# Altium footprint library Connectors.PcbLib: 120 footprints (part 1 of 8)
Each footprint in its own frame and in the unit in brackets; x right, y up, seen from the top. Pads: shape width x height; smd on the part's side, far side on the other; paste and mask are expansions set on the pad; w line width, h text height; cw(c..) or ccw(c..) is an arc to the next point about the centre after c.
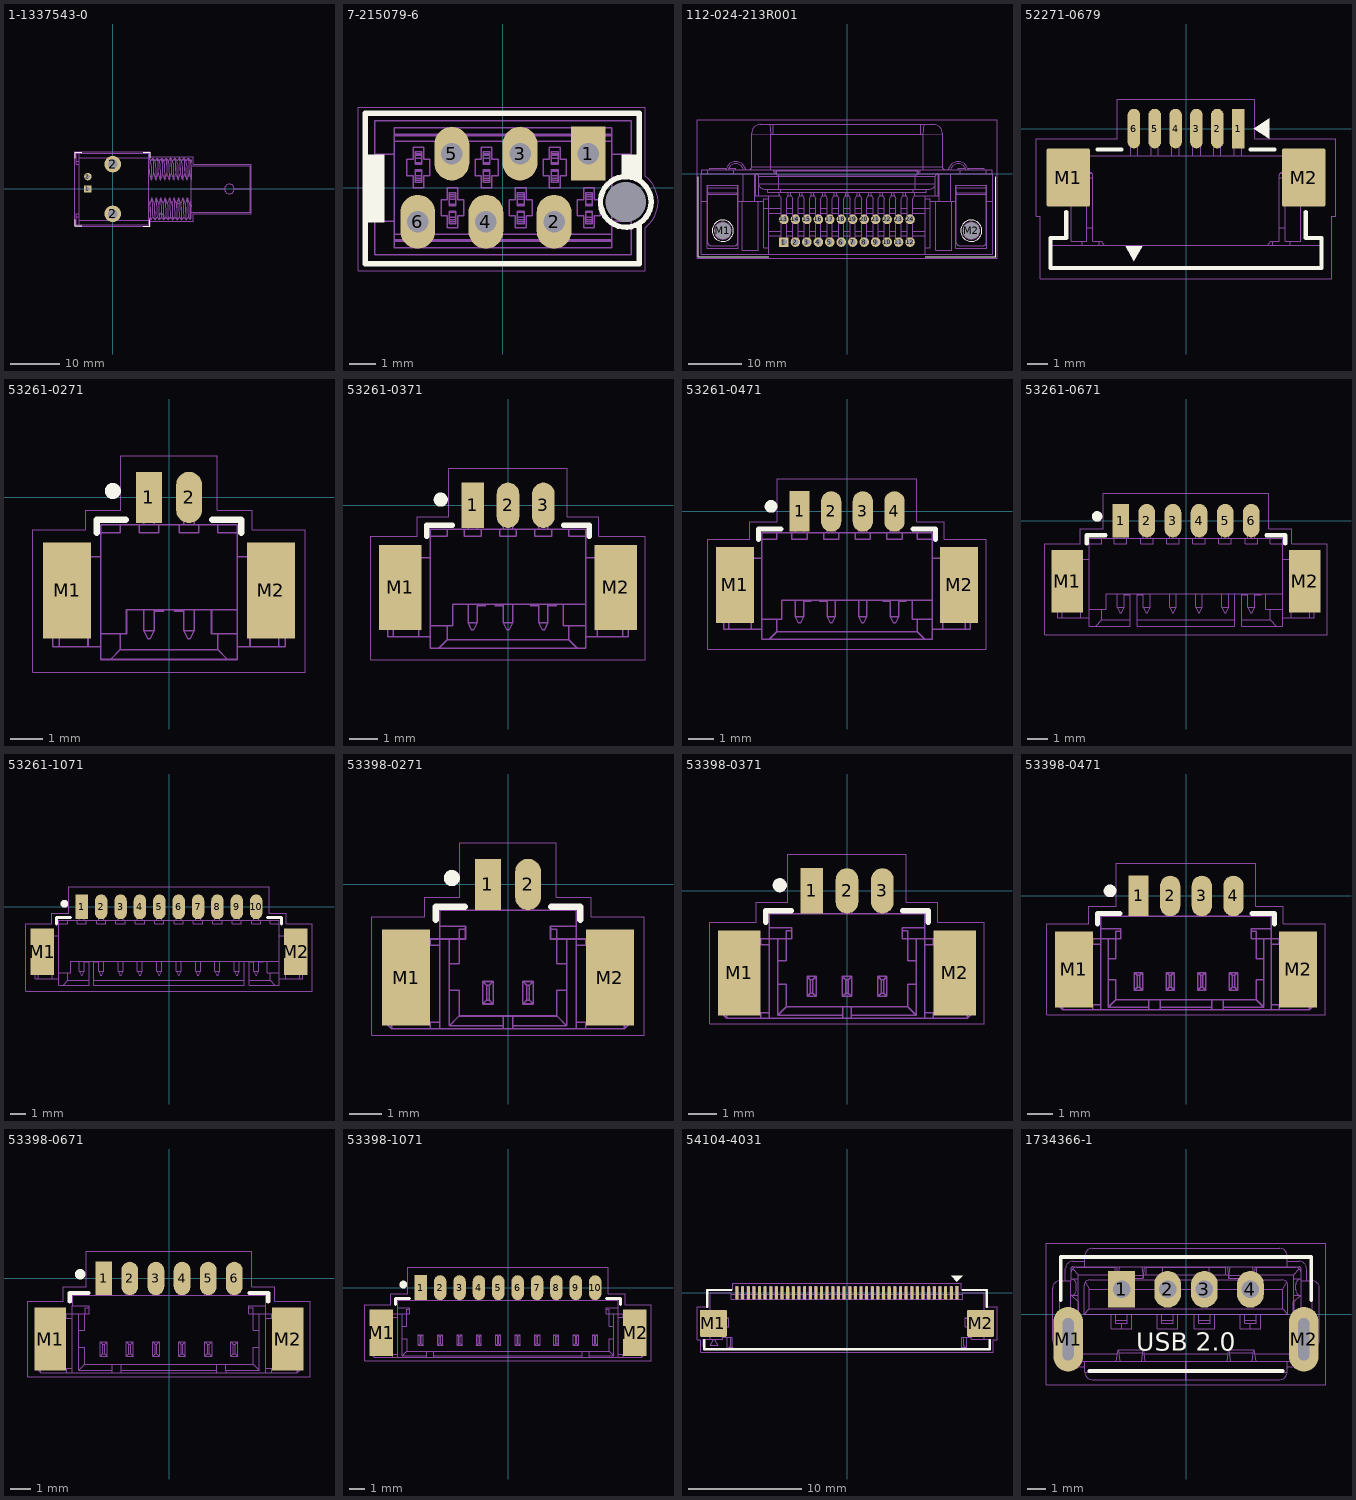
[diagram p0: the footprints below, top view; thin cyan lines are the x and y axes]

## 1-1337543-0 [mm] "BNC Connector"
height 0.6
pads (4):
  rect 1.53x1.53 hole 0.9: 1(-5.08,0)
  round 1.53 hole 0.9: 2(-5.08,2.54)
  round 3.4 hole 2: 2(0,-5.08) 2(0,5.08)
Top Overlay:
  lines w0.2: -7.65,-6.28 -7.65,-7.55 -6.38,-7.55 ; -7.65,6.28 -7.65,7.55 -6.38,7.55 ; 6.255,-7.575 7.525,-7.575 7.525,-6.305 ; 6.28,7.55 7.55,7.55 7.55,6.28
Top Courtyard:
  lines w0.025: -7.75,-7.65 7.65,-7.65 7.65,-6.6 16.4,-6.6 16.4,-5.1 28.35,-5.1 28.35,5.1 16.4,5.1 16.4,6.6 7.65,6.6 7.65,7.65 -7.75,7.65 -7.75,-7.65
Top Assembly:
  drawing of 1252 lines, arcs and shapes, not listed
  text ".Designator" at -6.763,-0.679 h3
3D body "1-1337543-0.STEP": height 15.85, standoff -4.25, extent -7.425,-7.35 28.075,7.35

## 7-215079-6 [mm] "Micro-MaTch Industrial Connector, 6 pin"
height 4
pads (7):
  rect 1.3x2 hole 0.8 mask+0.05: 1(3.175,1.27)
  oval 1.3x2 hole 0.8 mask+0.05: 2(1.905,-1.27) 3(0.635,1.27) 4(-0.635,-1.27) 5(-1.905,1.27) 6(-3.175,-1.27)
  round 0 hole 1.5 unplated: KEY(4.575,-0.53)
Top Overlay:
  circle w0.2: c4.575,-0.53 r0.943
  region: 4.425,1.22 5.125,1.22 5.125,0.4 4.425,0.4
  region: -4.425,1.22 -5.125,1.22 -5.125,-1.28 -4.425,-1.28
  lines w0.2: 5.075,-1.33 5.075,-2.83 -5.125,-2.83 -5.125,2.77 5.075,2.77 5.075,0.27
Top Courtyard:
  lines w0.025: -5.4,-3.1 5.3,-3.1 5.3,-1.486 ccw(c4.575,-0.53) 5.3,0.426 5.3,3 -5.4,3 -5.4,-3.1
Top Assembly:
  drawing of 386 lines, arcs and shapes, not listed
  text ".Designator" at -4.511,-3.953 h2
3D body "7-215079-6.STEP": height 4.2, standoff -2.95, extent -4.78,-2.5 4.78,2.5

## 112-024-213R001 [mm] "SCSI .085\" Ribbon Connector GPIB (IEEE-488)"
height 4
pads (26):
  rect 1.8x1.8 hole 1.1 paste-2539.97 mask+0: 1(-11.88,-12.85)
  round 1.8 hole 1.1 paste-2539.97 mask+0: 2(-9.72,-12.85) 3(-7.56,-12.85) 4(-5.4,-12.85) 5(-3.24,-12.85) 6(-1.08,-12.85) 7(1.08,-12.85) 8(3.24,-12.85) 9(5.4,-12.85) 10(7.56,-12.85) 11(9.72,-12.85) 12(11.88,-12.85) 13(-11.88,-8.56) 14(-9.72,-8.56) 15(-7.56,-8.56) 16(-5.4,-8.56) 17(-3.24,-8.56) 18(-1.08,-8.56) 19(1.08,-8.56) 20(3.24,-8.56) 21(5.4,-8.56) 22(7.56,-8.56) 23(9.72,-8.56) 24(11.88,-8.56)
  round 3.1 hole 3.1 unplated paste-2539.97 mask-1.549: M1(-23.4,-10.705) M2(23.4,-10.705)
Top Overlay:
  circle w0.2: c23.4,-10.705 r2
  circle w0.2: c-23.4,-10.705 r2
  lines w0.2: -28,-0.5 -28,-15.6 -14.7,-15.6 ; 14.7,-15.6 28,-15.6 28,-0.5
Top Courtyard:
  lines w0.025: -28.25,-15.85 -28.25,10.15 28.25,10.15 28.25,-15.85 -28.25,-15.85
Top Assembly:
  drawing of 461 lines, arcs and shapes, not listed
  text ".Designator" at -6.763,3.821 h3
3D body "112-024-213R001.x_t": height 15.36, standoff -4.49, extent -27.49,-15.1 27.49,9.37

## 52271-0679 [mm] "FFC/FPC Connector, 1.00mm Pitch, Slider Series, Right-Angle, Bottom Contact, 3.00mm Height, 6 Circuits, Tin-Bismuth Plating"
height 0.6
pads (8):
  rect 0.6x1.9 smd paste+0 mask+0.075: 1(2.5,0)
  oval 0.6x1.9 smd paste+0 mask+0.075: 2(1.5,0) 3(0.5,0) 4(-0.5,0) 5(-1.5,0) 6(-2.5,0)
  rrect10% 2.1x2.8 smd paste-50 mask+0.075: M1(-5.65,-2.35) M2(5.65,-2.35)
Top Overlay:
  region: 3.25,0 4,0.5 4,-0.5
  region: -2.5,-6.35 -2.1,-5.65 -2.9,-5.65
  lines w0.2: -5.75,-4 -5.75,-5.25 -6.5,-5.25 -6.5,-6.7 0,-6.7 6.5,-6.7 6.5,-5.25 5.75,-5.25 5.75,-4 ; -4.25,-1 -3.1,-1 ; 3.1,-1 4.25,-1
Top Paste:
  region: 5.75,-2.5 5.75,-3.5 6.7,-3.5 6.7,-2.5
  region: 5.75,-1.3 5.75,-2.3 6.7,-2.3 6.7,-1.3
  rectangle: 4.6,-3.5 5.6,-2.5
  rectangle: 4.6,-2.3 5.55,-1.3
  region: -5.55,-2.5 -5.55,-3.5 -4.6,-3.5 -4.6,-2.5
  region: -5.55,-1.3 -5.55,-2.3 -4.6,-2.3 -4.6,-1.3
  rectangle: -6.7,-3.5 -5.7,-2.5
  rectangle: -6.7,-2.3 -5.75,-1.3
Top Courtyard:
  lines w0.025: -7.2,-4.2 -7.2,-0.5 -3.3,-0.5 -3.3,1.4 3.3,1.4 3.3,-0.5 7.2,-0.5 7.2,-4.2 7,-4.2 7,-7.2 -7,-7.2 -7,-4.2 -7.2,-4.2
Top Assembly:
  lines w0.05: -5.5,-3.3 -5.746,-3.3 ; -4.975,-5.6 -4.975,-5.4 ; -4.775,-4.75 -4.475,-4.75 ; -4.775,-2.35 -4.475,-2.35 ; -4.737,-2.15 -4.513,-2.15 ; -4.175,-5.6 -4.175,-5.4 ; -2.675,-1.3 -2.675,0.7 -2.325,0.7 -2.325,-1.3 ; -1.675,-1.3 -1.675,0.7 -1.325,0.7 -1.325,-1.3 ; -0.675,-1.3 -0.675,0.7 -0.325,0.7 -0.325,-1.3 ; 0.325,-1.3 0.325,0.7 0.675,0.7 0.675,-1.3 ; 1.325,-1.3 1.325,0.7 1.675,0.7 1.675,-1.3 ; 2.325,-1.3 2.325,0.7 2.675,0.7 2.675,-1.3 ; 4.175,-5.6 4.175,-5.4 ; 4.475,-4.75 4.775,-4.75 ; 4.475,-2.35 4.775,-2.35 ; 4.513,-2.15 4.737,-2.15 ; 4.975,-5.6 4.975,-5.4 ; 5.5,-3.3 5.746,-3.3 ; -6.15,-3.1 -5.896,-3.1 ; -6.15,-3.1 -6.15,-1.5 ; -6.15,-3.1 -6.15,-3.3 -5.896,-3.3 ; -6.15,-1.5 -5.896,-1.5 ; -6.15,-1.5 -6.15,-1.3 -5.896,-1.3 ; -5.896,-3.3 -5.896,-3.1 ; -5.896,-3.3 -5.746,-3.3 ; -5.896,-3.1 -5.896,-1.5 ; -5.896,-1.5 -5.896,-1.3 ; -5.896,-1.3 -5.746,-1.3 ; -5.746,-3.3 -5.746,-1.3 ; -5.746,-1.3 -5.5,-1.3 ; -5.5,-1.3 -5.5,-5.4 -4.775,-5.4 -4.775,-2.25 cw(c-4.625,-2.25) -4.475,-2.25 -4.475,-5.4 -4.075,-5.4 -3.925,-5.6 ; -5.5,-1.3 5.5,-1.3 ; -3.925,-5.6 3.925,-5.6 ; -3.925,-5.6 -6.5,-5.6 -6.5,-6.7 6.5,-6.7 6.5,-5.6 3.925,-5.6 ; 3.925,-5.6 4.075,-5.4 4.475,-5.4 4.475,-2.25 cw(c4.625,-2.25) 4.775,-2.25 4.775,-5.4 5.5,-5.4 5.5,-1.3 ; 5.5,-1.3 5.746,-1.3 ; 5.746,-3.3 5.746,-1.3 ; 5.746,-3.3 5.896,-3.3 ; 5.746,-1.3 5.896,-1.3 ; 5.896,-3.3 6.15,-3.3 6.15,-3.1 ; 5.896,-3.3 5.896,-3.1 ; 5.896,-3.1 6.15,-3.1 ; 5.896,-3.1 5.896,-1.5 ; 5.896,-1.5 6.15,-1.5 ; 5.896,-1.5 5.896,-1.3 ; 5.896,-1.3 6.15,-1.3 6.15,-1.5 ; 6.15,-3.1 6.15,-1.5 ; -2.9,-5.657 -2.5,-6.35 -2.1,-5.657 -2.9,-5.657
  text ".Designator" at -6.763,-3.936 h3
3D body "522710679.stp": height 3, standoff 0, extent -6.5,-6.7 6.5,0.7

## 53261-0271 [mm]
height 1.55
pads (4):
  rect 0.8x1.6 smd mask+0.05: 1(-0.625,0)
  oval 0.8x1.6 smd mask+0.05: 2(0.625,0)
  rect 1.5x3 smd paste-2 mask+0.02: M1(-3.175,-2.9) M2(3.175,-2.9)
Top Overlay:
  circle w0.25: c-1.75,0.2 r0.125
  lines w0.2: -2.25,-1.1 -2.25,-0.7 -1.35,-0.7 ; 1.35,-0.7 2.25,-0.7 2.25,-1.1
Top Paste:
  rectangle: 2.5,-2.8 3.85,-1.45
  rectangle: 2.5,-4.35 3.85,-3
  rectangle: -3.85,-2.8 -2.5,-1.45
  rectangle: -3.85,-4.35 -2.5,-3
Top Courtyard:
  lines w0.025: -4.25,-5.45 4.25,-5.45 4.25,-1 2.6,-1 2.6,-0.4 1.5,-0.4 1.5,1.3 -1.5,1.3 -1.5,-0.4 -2.6,-0.4 -2.6,-1 -4.25,-1 -4.25,-5.45
Top Assembly:
  drawing of 229 lines, arcs and shapes, not listed
  text ".Designator" at -4.511,-2.953 h2
3D body "User Library-molex 53261.step": height 3.5, standoff 0, extent -3.825,-5.075 3.825,0.125

## 53261-0371 [mm]
height 1.55
pads (5):
  rect 0.8x1.6 smd mask+0.05: 1(-1.25,0)
  oval 0.8x1.6 smd mask+0.05: 2(0,0) 3(1.25,0)
  rect 1.5x3 smd paste-2 mask+0.02: M1(-3.8,-2.9) M2(3.8,-2.9)
Top Overlay:
  circle w0.25: c-2.375,0.2 r0.125
  lines w0.2: -2.875,-1.1 -2.875,-0.7 -1.975,-0.7 ; 1.975,-0.7 2.875,-0.7 2.875,-1.1
Top Paste:
  rectangle: 3.125,-2.8 4.475,-1.45
  rectangle: 3.125,-4.35 4.475,-3
  rectangle: -4.475,-2.8 -3.125,-1.45
  rectangle: -4.475,-4.35 -3.125,-3
Top Courtyard:
  lines w0.025: -4.85,-5.45 -4.85,-1.1 -3.2,-1.1 -3.2,-0.4 -2.1,-0.4 -2.1,1.3 2.1,1.3 2.1,-0.4 3.2,-0.4 3.2,-1.1 4.85,-1.1 4.85,-5.45 -4.85,-5.45
Top Assembly:
  drawing of 237 lines, arcs and shapes, not listed
  text ".Designator" at -4.511,-2.953 h2
3D body "User Library-molex 53261 (1).step": height 3.5, standoff 0, extent -4.45,-5.05 4.45,0.15

## 53261-0471 [mm]
height 1.55
pads (6):
  rect 0.8x1.6 smd mask+0.05: 1(-1.875,0)
  oval 0.8x1.6 smd mask+0.05: 2(-0.625,0) 3(0.625,0) 4(1.875,0)
  rect 1.5x3 smd paste-2 mask+0.02: M1(-4.425,-2.9) M2(4.425,-2.9)
Top Overlay:
  circle w0.25: c-3,0.2 r0.125
  lines w0.2: -3.5,-1.1 -3.5,-0.7 -2.6,-0.7 ; 2.6,-0.7 3.5,-0.7 3.5,-1.1
Top Paste:
  rectangle: 3.75,-2.8 5.1,-1.45
  rectangle: 3.75,-4.35 5.1,-3
  rectangle: -5.1,-2.8 -3.75,-1.45
  rectangle: -5.1,-4.35 -3.75,-3
Top Courtyard:
  lines w0.025: -5.5,-5.45 -5.5,-1.1 -3.85,-1.1 -3.85,-0.4 -2.75,-0.4 -2.75,1.3 2.75,1.3 2.75,-0.4 3.85,-0.4 3.85,-1.1 5.5,-1.1 5.5,-5.45 -5.5,-5.45
Top Assembly:
  drawing of 236 lines, arcs and shapes, not listed
  text ".Designator" at -4.511,-2.953 h2
3D body "User Library-molex 53261.step": height 3.5, standoff 0, extent -5.075,-5.05 5.075,0.15

## 53261-0671 [mm]
height 1.55
pads (8):
  rect 0.8x1.6 smd mask+0.05: 1(-3.125,0)
  oval 0.8x1.6 smd mask+0.05: 2(-1.875,0) 3(-0.625,0) 4(0.625,0) 5(1.875,0) 6(3.125,0)
  rect 1.5x3 smd paste-2 mask+0.02: M1(-5.675,-2.9) M2(5.675,-2.9)
Top Overlay:
  circle w0.25: c-4.25,0.2 r0.125
  lines w0.2: -4.75,-1.1 -4.75,-0.7 -3.85,-0.7 ; 3.85,-0.7 4.75,-0.7 4.75,-1.1
Top Paste:
  rectangle: -6.35,-4.35 -5,-3
  rectangle: -6.35,-2.8 -5,-1.45
  rectangle: 5,-4.35 6.35,-3
  rectangle: 5,-2.8 6.35,-1.45
Top Courtyard:
  lines w0.025: -6.75,-5.45 -6.75,-1.1 -5.05,-1.1 -5.05,-0.4 -3.95,-0.4 -3.95,1.3 3.95,1.3 3.95,-0.4 5.05,-0.4 5.05,-1.1 6.75,-1.1 6.75,-5.45 -6.75,-5.45
Top Assembly:
  drawing of 246 lines, arcs and shapes, not listed
  text ".Designator" at -4.511,-2.953 h2
3D body "User Library-molex 53261.step": height 3.5, standoff 0, extent -6.325,-5.05 6.325,0.15

## 53261-1071 [mm]
height 1.55
pads (12):
  rect 0.8x1.6 smd mask+0.05: 1(-5.625,0)
  oval 0.8x1.6 smd mask+0.05: 2(-4.375,0) 3(-3.125,0) 4(-1.875,0) 5(-0.625,0) 6(0.625,0) 7(1.875,0) 8(3.125,0) 9(4.375,0) 10(5.625,0)
  rect 1.5x3 smd paste-2 mask+0.02: M1(-8.175,-2.9) M2(8.175,-2.9)
Top Overlay:
  circle w0.25: c-6.75,0.2 r0.125
  lines w0.2: -7.25,-1.1 -7.25,-0.7 -6.35,-0.7 ; 6.35,-0.7 7.25,-0.7 7.25,-1.1
Top Paste:
  rectangle: 7.5,-2.8 8.85,-1.45
  rectangle: 7.5,-4.35 8.85,-3
  rectangle: -8.85,-2.8 -7.5,-1.45
  rectangle: -8.85,-4.35 -7.5,-3
Top Courtyard:
  lines w0.025: -9.25,-5.45 -9.25,-1.1 -7.55,-1.1 -7.55,-0.4 -6.45,-0.4 -6.45,1.3 6.45,1.3 6.45,-0.4 7.55,-0.4 7.55,-1.1 9.25,-1.1 9.25,-5.45 -9.25,-5.45
Top Assembly:
  drawing of 246 lines, arcs and shapes, not listed
  text ".Designator" at -4.511,-2.953 h2
3D body "User Library-molex 53261.step": height 3.5, standoff 0, extent -8.825,-5.05 8.825,0.15

## 53398-0271 [mm]
height 1.55
pads (4):
  rect 0.8x1.6 smd mask+0.05: 1(-0.625,0)
  oval 0.8x1.6 smd mask+0.05: 2(0.625,0)
  rect 1.5x3 smd paste-2 mask+0.02: M1(-3.175,-2.9) M2(3.175,-2.9)
Top Overlay:
  circle w0.25: c-1.75,0.2 r0.125
  lines w0.2: -2.25,-1.1 -2.25,-0.7 -1.35,-0.7 ; 1.35,-0.7 2.25,-0.7 2.25,-1.1
Top Paste:
  rectangle: -3.85,-4.35 -2.5,-3
  rectangle: -3.85,-2.8 -2.5,-1.45
  rectangle: 2.5,-4.35 3.85,-3
  rectangle: 2.5,-2.8 3.85,-1.45
Top Courtyard:
  lines w0.025: -4.25,-4.7 -4.25,-1 -2.6,-1 -2.6,-0.4 -1.5,-0.4 -1.5,1.3 1.5,1.3 1.5,-0.4 2.6,-0.4 2.6,-1 4.25,-1 4.25,-4.7 -4.25,-4.7
Top Assembly:
  lines w0.05: -3.625,-2.3 -3.825,-2.5 -3.825,-4.3 -3.625,-4.5 ; -2.125,-4.3 -2.425,-4.3 ; -2.125,-1.9 -2.425,-1.9 ; -0.785,-0.8 -0.785,-0.3 -0.465,-0.3 -0.465,-0.8 ; 0.465,-0.8 0.465,-0.3 0.785,-0.3 0.785,-0.8 ; 2.125,-4.3 2.425,-4.3 ; 2.125,-1.9 2.425,-1.9 ; 3.625,-2.3 3.825,-2.5 3.825,-4.3 3.625,-4.5 ; -3.625,-4.5 -3.625,-1.7 -2.425,-1.7 ; -3.625,-4.5 -2.425,-4.5 ; -2.425,-4.5 -2.425,-4.3 ; -2.425,-4.5 -2.125,-4.5 ; -2.425,-4.3 -3.425,-4.3 -3.425,-1.9 -2.425,-1.9 ; -2.425,-1.9 -2.425,-1.7 ; -2.425,-1.7 -2.125,-1.7 ; -2.125,-4.5 -0.15,-4.5 ; -2.125,-4.5 -2.125,-1.7 ; -2.125,-1.7 -1.825,-1.7 ; -2.125,-1.7 -2.125,-1.3 ; -2.125,-1.3 -1.325,-1.3 -1.325,-1.4 ; -2.125,-1.3 -2.125,-0.8 2.125,-0.8 2.125,-1.3 ; -1.825,-4.4 -1.525,-4.1 ; -1.825,-4.4 -1.825,-3.3 ; -1.825,-4.4 -0.15,-4.4 ; -1.825,-3.3 -1.525,-3.3 -1.525,-4.1 ; -1.825,-3.3 -1.825,-2.475 ; -1.825,-2.475 -1.825,-1.7 ; -1.825,-2.475 -1.525,-2.475 -1.525,-1.7 ; -1.825,-1.7 -1.525,-1.7 ; -1.525,-4.1 -0.15,-4.1 ; -1.525,-1.7 -1.525,-1.4 -1.325,-1.4 ; -1.525,-1.7 -1.325,-1.7 -1.325,-1.4 ; -0.785,-3.725 -0.668,-3.608 ; -0.785,-3.725 -0.785,-3.025 ; -0.785,-3.725 -0.465,-3.725 ; -0.785,-3.025 -0.668,-3.142 ; -0.785,-3.025 -0.465,-3.025 ; -0.668,-3.608 -0.668,-3.142 ; -0.668,-3.608 -0.582,-3.608 ; -0.668,-3.142 -0.582,-3.142 ; -0.582,-3.608 -0.582,-3.142 ; -0.582,-3.608 -0.465,-3.725 ; -0.582,-3.142 -0.465,-3.025 ; -0.465,-3.725 -0.465,-3.025 ; -0.15,-4.5 -0.15,-4.4 ; -0.15,-4.5 0.15,-4.5 ; -0.15,-4.4 -0.15,-4.1 ; -0.15,-4.1 0.15,-4.1 ; 0.15,-4.5 0.15,-4.4 ; 0.15,-4.5 2.125,-4.5 ; 0.15,-4.4 1.825,-4.4 ; 0.15,-4.4 0.15,-4.1 ; 0.15,-4.1 1.525,-4.1 ; 0.465,-3.725 0.582,-3.608 ; 0.465,-3.725 0.465,-3.025 ; 0.465,-3.725 0.785,-3.725 ; 0.465,-3.025 0.582,-3.142 ; 0.465,-3.025 0.785,-3.025 ; 0.582,-3.608 0.582,-3.142 ; 0.582,-3.608 0.668,-3.608 ; 0.582,-3.142 0.668,-3.142 ; 0.668,-3.608 0.785,-3.725 ; 0.668,-3.608 0.668,-3.142 ; 0.668,-3.142 0.785,-3.025 ; 0.785,-3.725 0.785,-3.025 ; 1.325,-1.4 1.525,-1.4 1.525,-1.7 ; 1.325,-1.4 1.325,-1.3 2.125,-1.3 ; 1.325,-1.4 1.325,-1.7 1.525,-1.7 ; 1.525,-4.1 1.825,-4.4 ; 1.525,-4.1 1.525,-3.3 1.825,-3.3 ; 1.525,-1.7 1.525,-2.475 1.825,-2.475 ; 1.525,-1.7 1.825,-1.7 ; 1.825,-4.4 1.825,-3.3 ; 1.825,-3.3 1.825,-2.475 ; 1.825,-2.475 1.825,-1.7 ; 1.825,-1.7 2.125,-1.7 ; 2.125,-4.5 2.125,-1.7 ; 2.125,-4.5 2.425,-4.5 ; 2.125,-1.7 2.125,-1.3 ; 2.125,-1.7 2.425,-1.7 ; 2.425,-4.5 2.425,-4.3 ; 2.425,-4.5 3.625,-4.5 ; 2.425,-4.3 3.425,-4.3 3.425,-1.9 2.425,-1.9 ; 2.425,-1.9 2.425,-1.7 ; 2.425,-1.7 3.625,-1.7 3.625,-4.5
  text ".Designator" at -4.511,-2.328 h2
3D body "53398-0271.step": height 4.7, standoff 0, extent -3.825,-4.425 3.825,-0.225

## 53398-0371 [mm]
height 1.55
pads (5):
  rect 0.8x1.6 smd mask+0.05: 1(-1.25,0)
  oval 0.8x1.6 smd mask+0.05: 2(0,0) 3(1.25,0)
  rect 1.5x3 smd paste-2 mask+0.02: M1(-3.8,-2.9) M2(3.8,-2.9)
Top Overlay:
  circle w0.25: c-2.375,0.2 r0.125
  lines w0.2: -2.875,-1.1 -2.875,-0.7 -1.975,-0.7 ; 1.975,-0.7 2.875,-0.7 2.875,-1.1
Top Paste:
  rectangle: 3.125,-2.8 4.475,-1.45
  rectangle: 3.125,-4.35 4.475,-3
  rectangle: -4.475,-2.8 -3.125,-1.45
  rectangle: -4.475,-4.35 -3.125,-3
Top Courtyard:
  lines w0.025: -4.85,-4.7 4.85,-4.7 4.85,-1.1 3.2,-1.1 3.2,-0.4 2.1,-0.4 2.1,1.3 -2.1,1.3 -2.1,-0.4 -3.2,-0.4 -3.2,-1.1 -4.85,-1.1 -4.85,-4.7
Top Assembly:
  lines w0.05: -4.25,-2.3 -4.45,-2.5 -4.45,-4.3 -4.25,-4.5 ; -2.75,-4.3 -3.05,-4.3 ; -2.75,-1.9 -3.05,-1.9 ; -1.41,-0.8 -1.41,-0.3 -1.09,-0.3 -1.09,-0.8 ; -0.16,-0.8 -0.16,-0.3 0.16,-0.3 0.16,-0.8 ; 1.09,-0.8 1.09,-0.3 1.41,-0.3 1.41,-0.8 ; 2.75,-4.3 3.05,-4.3 ; 2.75,-1.9 3.05,-1.9 ; 4.25,-2.3 4.45,-2.5 4.45,-4.3 4.25,-4.5 ; -4.25,-4.5 -3.05,-4.5 ; -4.25,-4.5 -4.25,-1.7 -3.05,-1.7 ; -3.05,-4.5 -2.75,-4.5 ; -3.05,-4.5 -3.05,-4.3 ; -3.05,-4.3 -4.05,-4.3 -4.05,-1.9 -3.05,-1.9 ; -3.05,-1.9 -3.05,-1.7 ; -3.05,-1.7 -2.75,-1.7 ; -2.75,-4.5 -0.15,-4.5 ; -2.75,-4.5 -2.75,-1.7 ; -2.75,-1.7 -2.75,-1.3 ; -2.75,-1.7 -2.45,-1.7 ; -2.75,-1.3 -2.75,-0.8 2.75,-0.8 2.75,-1.3 ; -2.75,-1.3 -1.95,-1.3 -1.95,-1.4 ; -2.45,-4.4 -0.15,-4.4 ; -2.45,-4.4 -2.45,-3.3 ; -2.45,-4.4 -2.15,-4.1 ; -2.45,-3.3 -2.45,-2.475 ; -2.45,-3.3 -2.15,-3.3 -2.15,-4.1 ; -2.45,-2.475 -2.15,-2.475 -2.15,-1.7 ; -2.45,-2.475 -2.45,-1.7 ; -2.45,-1.7 -2.15,-1.7 ; -2.15,-4.1 -0.15,-4.1 ; -2.15,-1.7 -2.15,-1.4 -1.95,-1.4 ; -2.15,-1.7 -1.95,-1.7 -1.95,-1.4 ; -1.41,-3.725 -1.41,-3.025 ; -1.41,-3.725 -1.09,-3.725 ; -1.41,-3.725 -1.293,-3.608 ; -1.41,-3.025 -1.09,-3.025 ; -1.41,-3.025 -1.293,-3.142 ; -1.293,-3.608 -1.293,-3.142 ; -1.293,-3.608 -1.207,-3.608 ; -1.293,-3.142 -1.207,-3.142 ; -1.207,-3.608 -1.207,-3.142 ; -1.207,-3.608 -1.09,-3.725 ; -1.207,-3.142 -1.09,-3.025 ; -1.09,-3.725 -1.09,-3.025 ; -0.16,-3.725 -0.16,-3.025 ; -0.16,-3.725 0.16,-3.725 ; -0.16,-3.725 -0.043,-3.608 ; -0.16,-3.025 0.16,-3.025 ; -0.16,-3.025 -0.043,-3.142 ; -0.15,-4.5 0.15,-4.5 ; -0.15,-4.5 -0.15,-4.4 ; -0.15,-4.4 -0.15,-4.1 ; -0.15,-4.1 0.15,-4.1 ; -0.043,-3.608 -0.043,-3.142 ; -0.043,-3.608 0.043,-3.608 ; -0.043,-3.142 0.043,-3.142 ; 0.043,-3.608 0.043,-3.142 ; 0.043,-3.608 0.16,-3.725 ; 0.043,-3.142 0.16,-3.025 ; 0.15,-4.5 2.75,-4.5 ; 0.15,-4.5 0.15,-4.4 ; 0.15,-4.4 0.15,-4.1 ; 0.15,-4.4 2.45,-4.4 ; 0.15,-4.1 2.15,-4.1 ; 0.16,-3.725 0.16,-3.025 ; 1.09,-3.725 1.41,-3.725 ; 1.09,-3.725 1.09,-3.025 ; 1.09,-3.725 1.207,-3.608 ; 1.09,-3.025 1.41,-3.025 ; 1.09,-3.025 1.207,-3.142 ; 1.207,-3.608 1.207,-3.142 ; 1.207,-3.608 1.293,-3.608 ; 1.207,-3.142 1.293,-3.142 ; 1.293,-3.608 1.41,-3.725 ; 1.293,-3.608 1.293,-3.142 ; 1.293,-3.142 1.41,-3.025 ; 1.41,-3.725 1.41,-3.025 ; 1.95,-1.4 1.95,-1.3 2.75,-1.3 ; 1.95,-1.4 1.95,-1.7 2.15,-1.7 ; 1.95,-1.4 2.15,-1.4 2.15,-1.7 ; 2.15,-4.1 2.15,-3.3 2.45,-3.3 ; 2.15,-4.1 2.45,-4.4 ; 2.15,-1.7 2.45,-1.7 ; 2.15,-1.7 2.15,-2.475 2.45,-2.475 ; 2.45,-4.4 2.45,-3.3 ; 2.45,-3.3 2.45,-2.475 ; 2.45,-2.475 2.45,-1.7 ; 2.45,-1.7 2.75,-1.7 ; 2.75,-4.5 3.05,-4.5 ; 2.75,-4.5 2.75,-1.7 ; 2.75,-1.7 3.05,-1.7 ; 2.75,-1.7 2.75,-1.3 ; 3.05,-4.5 4.25,-4.5 ; 3.05,-4.5 3.05,-4.3 ; 3.05,-4.3 4.05,-4.3 4.05,-1.9 3.05,-1.9 ; 3.05,-1.9 3.05,-1.7 ; 3.05,-1.7 4.25,-1.7 4.25,-4.5
  text ".Designator" at -4.511,-2.328 h2
3D body "53398-0371.step": height 4.7, standoff 0, extent -4.425,-4.45 4.475,-0.25

## 53398-0471 [mm]
height 1.55
pads (6):
  rect 0.8x1.6 smd mask+0.05: 1(-1.875,0)
  oval 0.8x1.6 smd mask+0.05: 2(-0.625,0) 3(0.625,0) 4(1.875,0)
  rect 1.5x3 smd paste-2 mask+0.02: M1(-4.425,-2.9) M2(4.425,-2.9)
Top Overlay:
  circle w0.25: c-3,0.2 r0.125
  lines w0.2: -3.5,-1.1 -3.5,-0.7 -2.6,-0.7 ; 2.6,-0.7 3.5,-0.7 3.5,-1.1
Top Paste:
  rectangle: -5.1,-4.35 -3.75,-3
  rectangle: -5.1,-2.8 -3.75,-1.45
  rectangle: 3.75,-4.35 5.1,-3
  rectangle: 3.75,-2.8 5.1,-1.45
Top Courtyard:
  lines w0.025: -5.5,-4.7 5.5,-4.7 5.5,-1.1 3.85,-1.1 3.85,-0.4 2.75,-0.4 2.75,1.3 -2.75,1.3 -2.75,-0.4 -3.85,-0.4 -3.85,-1.1 -5.5,-1.1 -5.5,-4.7
Top Assembly:
  lines w0.05: -4.875,-2.3 -5.075,-2.5 -5.075,-4.3 -4.875,-4.5 ; -3.375,-4.3 -3.675,-4.3 ; -3.375,-1.9 -3.675,-1.9 ; -2.035,-0.8 -2.035,-0.3 -1.715,-0.3 -1.715,-0.8 ; -0.785,-0.8 -0.785,-0.3 -0.465,-0.3 -0.465,-0.8 ; 0.465,-0.8 0.465,-0.3 0.785,-0.3 0.785,-0.8 ; 1.715,-0.8 1.715,-0.3 2.035,-0.3 2.035,-0.8 ; 3.375,-4.3 3.675,-4.3 ; 3.375,-1.9 3.675,-1.9 ; 4.875,-2.3 5.075,-2.5 5.075,-4.3 4.875,-4.5 ; -4.875,-4.5 -3.675,-4.5 ; -4.875,-4.5 -4.875,-1.7 -3.675,-1.7 ; -3.675,-4.5 -3.375,-4.5 ; -3.675,-4.5 -3.675,-4.3 ; -3.675,-4.3 -4.675,-4.3 -4.675,-1.9 -3.675,-1.9 ; -3.675,-1.9 -3.675,-1.7 ; -3.675,-1.7 -3.375,-1.7 ; -3.375,-4.5 -1.475,-4.5 ; -3.375,-4.5 -3.375,-1.7 ; -3.375,-1.7 -3.375,-1.3 ; -3.375,-1.7 -3.075,-1.7 ; -3.375,-1.3 -3.375,-0.8 3.375,-0.8 3.375,-1.3 ; -3.375,-1.3 -2.575,-1.3 -2.575,-1.4 ; -3.075,-4.4 -1.475,-4.4 ; -3.075,-4.4 -3.075,-3.3 ; -3.075,-4.4 -2.775,-4.1 ; -3.075,-3.3 -3.075,-2.475 ; -3.075,-3.3 -2.775,-3.3 -2.775,-4.1 ; -3.075,-2.475 -2.775,-2.475 -2.775,-1.7 ; -3.075,-2.475 -3.075,-1.7 ; -3.075,-1.7 -2.775,-1.7 ; -2.775,-4.1 -1.475,-4.1 ; -2.775,-1.7 -2.575,-1.7 -2.575,-1.4 ; -2.775,-1.7 -2.775,-1.4 -2.575,-1.4 ; -2.035,-3.725 -1.715,-3.725 ; -2.035,-3.725 -2.035,-3.025 ; -2.035,-3.725 -1.918,-3.608 ; -2.035,-3.025 -1.715,-3.025 ; -2.035,-3.025 -1.918,-3.142 ; -1.918,-3.608 -1.918,-3.142 ; -1.918,-3.608 -1.832,-3.608 ; -1.918,-3.142 -1.832,-3.142 ; -1.832,-3.608 -1.715,-3.725 ; -1.832,-3.608 -1.832,-3.142 ; -1.832,-3.142 -1.715,-3.025 ; -1.715,-3.725 -1.715,-3.025 ; -1.475,-4.5 -1.025,-4.5 ; -1.475,-4.5 -1.475,-4.4 ; -1.475,-4.4 -1.475,-4.1 ; -1.475,-4.1 -1.025,-4.1 ; -1.025,-4.5 1.025,-4.5 ; -1.025,-4.5 -1.025,-4.4 ; -1.025,-4.4 -1.025,-4.1 ; -1.025,-4.4 1.025,-4.4 ; -1.025,-4.1 1.025,-4.1 ; -0.785,-3.725 -0.785,-3.025 ; -0.785,-3.725 -0.465,-3.725 ; -0.785,-3.725 -0.668,-3.608 ; -0.785,-3.025 -0.465,-3.025 ; -0.785,-3.025 -0.668,-3.142 ; -0.668,-3.608 -0.668,-3.142 ; -0.668,-3.608 -0.582,-3.608 ; -0.668,-3.142 -0.582,-3.142 ; -0.582,-3.608 -0.465,-3.725 ; -0.582,-3.608 -0.582,-3.142 ; -0.582,-3.142 -0.465,-3.025 ; -0.465,-3.725 -0.465,-3.025 ; 0.465,-3.725 0.785,-3.725 ; 0.465,-3.725 0.465,-3.025 ; 0.465,-3.725 0.582,-3.608 ; 0.465,-3.025 0.785,-3.025 ; 0.465,-3.025 0.582,-3.142 ; 0.582,-3.608 0.668,-3.608 ; 0.582,-3.608 0.582,-3.142 ; 0.582,-3.142 0.668,-3.142 ; 0.668,-3.608 0.668,-3.142 ; 0.668,-3.608 0.785,-3.725 ; 0.668,-3.142 0.785,-3.025 ; 0.785,-3.725 0.785,-3.025 ; 1.025,-4.5 1.475,-4.5 ; 1.025,-4.5 1.025,-4.4 ; 1.025,-4.4 1.025,-4.1 ; 1.025,-4.1 1.475,-4.1 ; 1.475,-4.5 3.375,-4.5 ; 1.475,-4.5 1.475,-4.4 ; 1.475,-4.4 1.475,-4.1 ; 1.475,-4.4 3.075,-4.4 ; 1.475,-4.1 2.775,-4.1 ; 1.715,-3.725 2.035,-3.725 ; 1.715,-3.725 1.715,-3.025 ; 1.715,-3.725 1.832,-3.608 ; 1.715,-3.025 2.035,-3.025 ; 1.715,-3.025 1.832,-3.142 ; 1.832,-3.608 1.918,-3.608 ; 1.832,-3.608 1.832,-3.142 ; 1.832,-3.142 1.918,-3.142 ; 1.918,-3.608 1.918,-3.142 ; 1.918,-3.608 2.035,-3.725 ; 1.918,-3.142 2.035,-3.025 ; 2.035,-3.725 2.035,-3.025 ; 2.575,-1.4 2.575,-1.3 3.375,-1.3 ; 2.575,-1.4 2.575,-1.7 2.775,-1.7 ; 2.575,-1.4 2.775,-1.4 2.775,-1.7 ; 2.775,-4.1 2.775,-3.3 3.075,-3.3 ; 2.775,-4.1 3.075,-4.4 ; 2.775,-1.7 3.075,-1.7 ; 2.775,-1.7 2.775,-2.475 3.075,-2.475 ; 3.075,-4.4 3.075,-3.3 ; 3.075,-3.3 3.075,-2.475 ; 3.075,-2.475 3.075,-1.7 ; 3.075,-1.7 3.375,-1.7 ; 3.375,-4.5 3.675,-4.5 ; 3.375,-4.5 3.375,-1.7 ; 3.375,-1.7 3.675,-1.7 ; 3.375,-1.7 3.375,-1.3 ; 3.675,-4.5 4.875,-4.5 ; 3.675,-4.5 3.675,-4.3 ; 3.675,-4.3 4.675,-4.3 4.675,-1.9 3.675,-1.9 ; 3.675,-1.9 3.675,-1.7 ; 3.675,-1.7 4.875,-1.7 4.875,-4.5
  text ".Designator" at -4.511,-2.328 h2
3D body "53398-0471.step": height 4.7, standoff 0, extent -5,-4.375 5.15,-0.175

## 53398-0671 [mm]
height 1.55
pads (8):
  rect 0.8x1.6 smd mask+0.05: 1(-3.125,0)
  oval 0.8x1.6 smd mask+0.05: 2(-1.875,0) 3(-0.625,0) 4(0.625,0) 5(1.875,0) 6(3.125,0)
  rect 1.5x3 smd paste-2 mask+0.02: M1(-5.675,-2.9) M2(5.675,-2.9)
Top Overlay:
  circle w0.25: c-4.25,0.2 r0.125
  lines w0.2: -4.75,-1.1 -4.75,-0.7 -3.85,-0.7 ; 3.85,-0.7 4.75,-0.7 4.75,-1.1
Top Paste:
  rectangle: 5,-2.8 6.35,-1.45
  rectangle: 5,-4.35 6.35,-3
  rectangle: -6.35,-2.8 -5,-1.45
  rectangle: -6.35,-4.35 -5,-3
Top Courtyard:
  lines w0.025: -6.75,-4.7 6.75,-4.7 6.75,-1.1 5.05,-1.1 5.05,-0.4 3.95,-0.4 3.95,1.3 -3.95,1.3 -3.95,-0.4 -5.05,-0.4 -5.05,-1.1 -6.75,-1.1 -6.75,-4.7
Top Assembly:
  drawing of 180 lines, arcs and shapes, not listed
  text ".Designator" at -4.511,-2.328 h2
3D body "53398-0671.step": height 4.7, standoff 0, extent -6.3,-4.4 6.35,-0.2

## 53398-1071 [mm]
height 1.55
pads (12):
  rect 0.8x1.6 smd mask+0.05: 1(-5.625,0)
  oval 0.8x1.6 smd mask+0.05: 2(-4.375,0) 3(-3.125,0) 4(-1.875,0) 5(-0.625,0) 6(0.625,0) 7(1.875,0) 8(3.125,0) 9(4.375,0) 10(5.625,0)
  rect 1.5x3 smd paste-2 mask+0.02: M1(-8.175,-2.9) M2(8.175,-2.9)
Top Overlay:
  circle w0.25: c-6.75,0.2 r0.125
  lines w0.2: -7.25,-1.1 -7.25,-0.7 -6.35,-0.7 ; 6.35,-0.7 7.25,-0.7 7.25,-1.1
Top Paste:
  rectangle: 7.5,-2.8 8.85,-1.45
  rectangle: 7.5,-4.35 8.85,-3
  rectangle: -8.85,-2.8 -7.5,-1.45
  rectangle: -8.85,-4.35 -7.5,-3
Top Courtyard:
  lines w0.025: -9.25,-4.7 9.25,-4.7 9.25,-1.1 7.55,-1.1 7.55,-0.4 6.45,-0.4 6.45,1.3 -6.45,1.3 -6.45,-0.4 -7.55,-0.4 -7.55,-1.1 -9.25,-1.1 -9.25,-4.7
Top Assembly:
  drawing of 240 lines, arcs and shapes, not listed
  text ".Designator" at -4.511,-2.328 h2
3D body "53398-1071.step": height 4.7, standoff 0, extent -8.825,-4.35 8.825,-0.15

## 54104-4031 [mm] "FFC/FPC Connector, 0.50mm Pitch, Slider Series Right-Angle, Top Contact, 2.00mm Height, 40 Circuits, Gold Plating"
height 0.6
pads (42):
  rect 0.27x1.2 smd paste-0.023 mask+0.05: 1(9.747,-0.011)
  oval 0.27x1.2 smd paste-0.023 mask+0.05: 2(9.247,-0.011) 3(8.747,-0.011) 4(8.247,-0.011) 5(7.747,-0.011) 6(7.247,-0.011) 7(6.747,-0.011) 8(6.247,-0.011) 9(5.747,-0.011) 10(5.247,-0.011) 11(4.747,-0.011) 12(4.247,-0.011) 13(3.747,-0.011) 14(3.247,-0.011) 15(2.747,-0.011) 16(2.247,-0.011) 17(1.747,-0.011) 18(1.247,-0.011) 19(0.747,-0.011) 20(0.247,-0.011) 21(-0.253,-0.011) 22(-0.753,-0.011) 23(-1.253,-0.011) 24(-1.753,-0.011) 25(-2.253,-0.011) 26(-2.753,-0.011) 27(-3.253,-0.011) 28(-3.753,-0.011) 29(-4.253,-0.011) 30(-4.753,-0.011) 31(-5.253,-0.011) 32(-5.753,-0.011) 33(-6.253,-0.011) 34(-6.753,-0.011) 35(-7.253,-0.011) 36(-7.753,-0.011) 37(-8.253,-0.011) 38(-8.753,-0.011) 39(-9.253,-0.011) 40(-9.753,-0.011)
  rrect10% 2.4x2.4 smd paste-50 mask+0.05: M1(-11.85,-2.7) M2(11.85,-2.7)
Top Overlay:
  region: 9.75,1 10.25,1.5 9.25,1.5
  lines w0.2: -12.65,-4.2 -12.65,-5 12.65,-5 12.65,-4.2 ; -12.4,-1.25 -12.4,0.25 -10.25,0.25 ; 10.25,0.25 12.4,0.25 12.4,-1.25
Top Paste:
  region: 11.95,-2.8 11.95,-3.8 12.95,-3.8 12.95,-2.8
  region: 11.95,-1.6 11.95,-2.6 12.95,-2.6 12.95,-1.6
  rectangle: 10.75,-3.8 11.75,-2.8
  rectangle: 10.75,-2.6 11.75,-1.6
  region: -11.75,-2.8 -11.75,-3.8 -10.75,-3.8 -10.75,-2.8
  region: -11.75,-1.6 -11.75,-2.6 -10.75,-2.6 -10.75,-1.6
  rectangle: -12.95,-3.8 -11.95,-2.8
  rectangle: -12.95,-2.6 -11.95,-1.6
Top Courtyard:
  lines w0.025: -13.3,-4.15 -13.3,-1.25 -12.45,-1.25 -12.45,0.3 -10.15,0.3 -10.15,0.85 10.15,0.85 10.15,0.3 12.45,0.3 12.45,-1.25 13.3,-1.25 13.3,-4.15 12.95,-4.15 12.95,-5.25 -12.95,-5.25 -12.95,-4.15 -13.3,-4.15
Top Assembly:
  drawing of 894 lines, arcs and shapes, not listed
  text ".Designator" at -6.763,-3.346 h3
3D body "541044031.stp": height 2.01, standoff -0.04, extent -12.75,-5.25 12.75,0.35

## 1734366-1 [mm] "USB 2.0 Type A Vertical THR"
height 14.9
pads (6):
  rect 1.45x2 hole 0.95: 1(-3.5,1.34)
  oval 1.45x2 hole 0.95: 2(-1,1.34) 3(1,1.34) 4(3.5,1.34)
  oval 1.6x3.5 hole 0.6 slot 2.3 at 90 deg: M1(-6.4,-1.37) M2(6.4,-1.37)
Top Overlay:
  lines w0.2: -6.8,0.75 -6.8,3.1 6.8,3.1 6.8,0.75 ; -5.25,-3.1 5.25,-3.1
  text "USB 2.0" at -2.69,-2 h1
Top Courtyard:
  lines w0.025: -7.6,-3.85 -7.6,3.85 7.6,3.85 7.6,-3.85 -7.6,-3.85
Top Assembly:
  drawing of 210 lines, arcs and shapes, not listed
  text ".Designator" at -4.511,-1.803 h2
3D body "c-1734366-1-c1-3d.STEP": height 15.1, standoff -3.83, extent -7.9,-3.56 7.9,3.56